# Altium schematic symbol library PTUMotorDriver.SchLib: 64 symbols
Pins are listed as number, name and electrical type; pins without a type are passive.

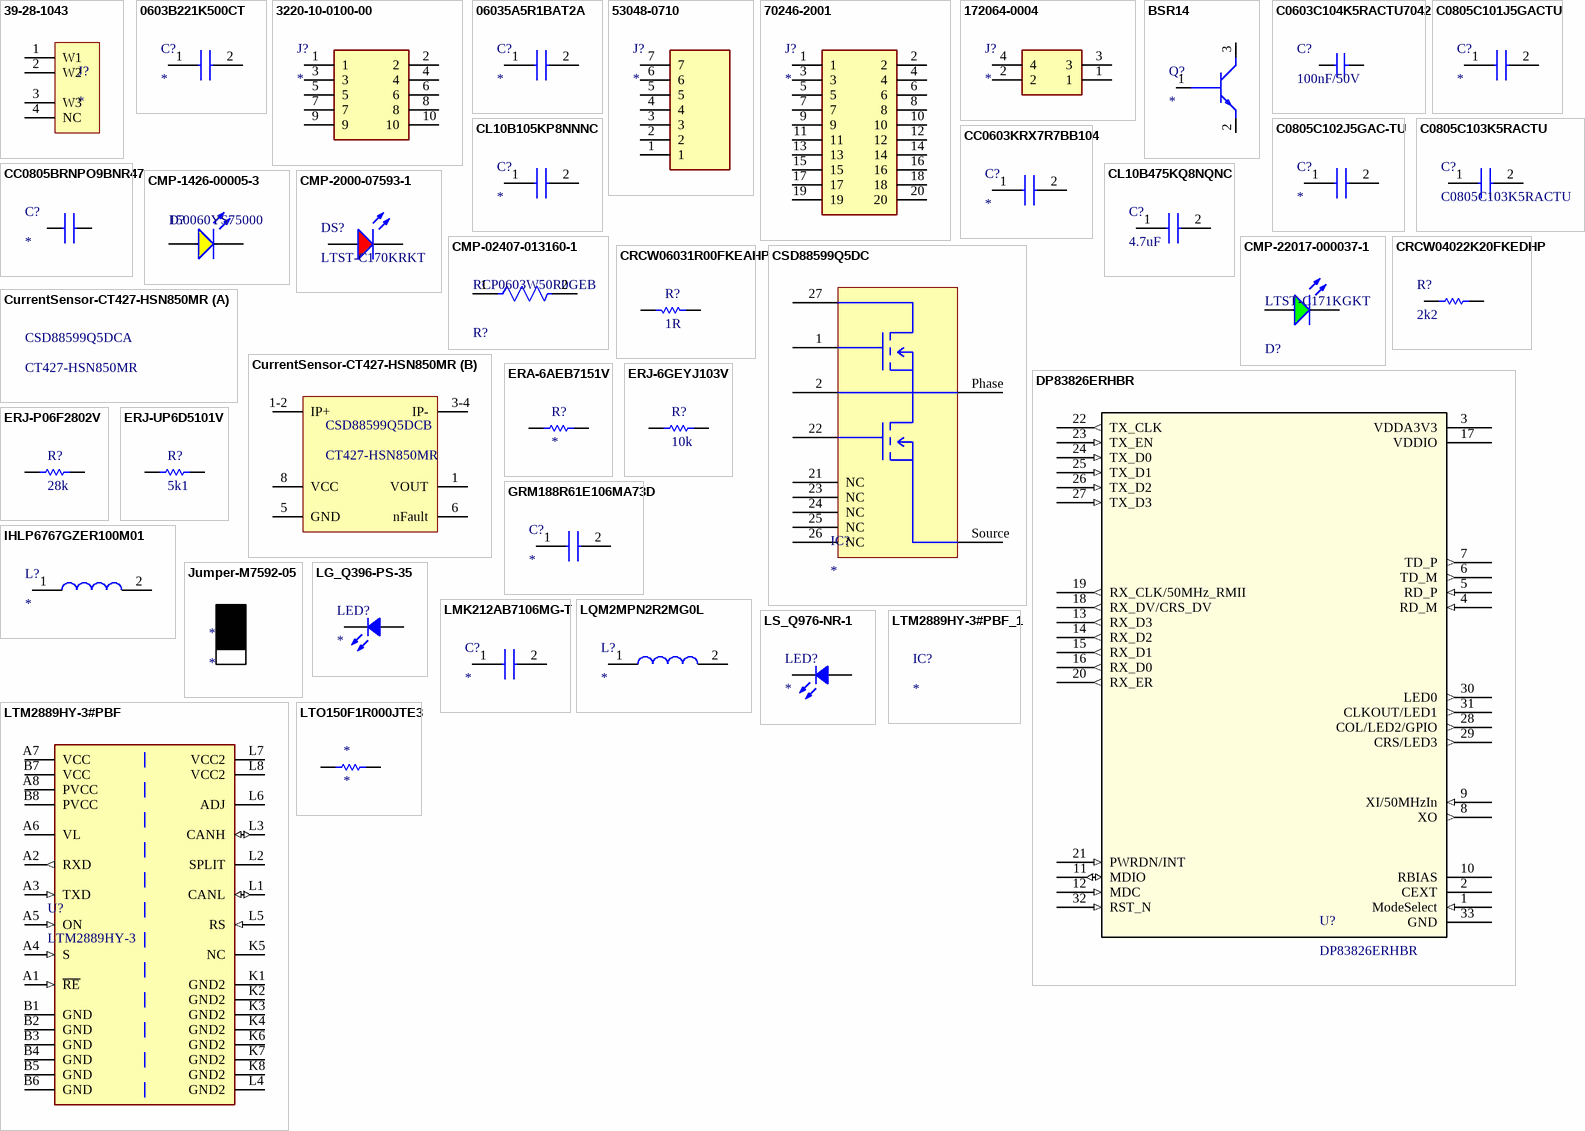
[diagram p0: symbols 39-28-1043 to LTO150F1R000JTE3]

## 39-28-1043
designator J?
Connector; Manufacturer_Name: Molex; Datasheet Link: https://www.molex.com/pdm_docs/sd/039281023_sd.pdf; Height: 12.8mm; Manufacturer_Part_Number: 39-28-1043; Mouser Part Number: 538-39-28-1043; Mouser Price/Stock: https://www.mouser.co.uk/ProductDetail/Molex/39-28-1043?qs=LQQHZ4xw2XCMHoV0KRLGhg%3D%3D; Arrow Part Number: 39-28-1043; Arrow Price/Stock: https://www.arrow.com/en/products/39-28-1043/molex?region=nac; Supplier 1: Mouser; Supplier Part Number 1: 538-39-28-1043; Supplier 2: Digikey; Supplier Part Number 2: WM3801-ND
footprint 39-28-1043
pins: 1 W1, 2 W2, 3 W3, 4 NC

## 0603B221K500CT
designator C?
Capacitor; Manufacturer_Name: Walsin Technology Corporation; Manufacturer_Part_Number: 0603B221K500CT; Datasheet Link: http://www.passivecomponent.com/wp-content/uploads/datasheet/WTC_MLCC_General_Purpose.pdf; Height: 0.87mm; Supplier 1: Digikey; Supplier Part Number 1: 1292-1407-1-ND; Supplier 2: Digikey; Supplier Part Number 2: 1292-1407-6-ND
footprint CAPC1608X87N
pins: 1, 2

## 3220-10-0100-00
designator J?
Connector; Manufacturer_Name: CNC Tech; Manufacturer_Part_Number: 3220-10-0100-00; Datasheet Link: https://datasheet.datasheetarchive.com/originals/dk/DKDS-7/133059.pdf; Height: 5.6mm; Arrow Part Number: 3220-10-0100-00; Arrow Price/Stock: https://www.arrow.com/en/products/3220-10-0100-00/cnc-tech-llc?utm_currency=USD&region=nac
footprint 322010010000
pins: 1, 2, 3, 4, 5, 6, 7, 8, 9, 10

## 06035A5R1BAT2A
designator C?
Capacitor; Manufacturer_Name: Kyocera AVX; Manufacturer_Part_Number: 06035A5R1BAT2A; Datasheet Link: https://componentsearchengine.com/Datasheets/1/06031A100FAT2A.pdf; Height: 0.9mm; Mouser Part Number: 581-06035A5R1BAT2A; Mouser Price/Stock: https://www.mouser.com/Search/Refine.aspx?Keyword=581-06035A5R1BAT2A; Supplier 1: Digikey; Supplier Part Number 1: 478-12709-1-ND; Supplier 2: Digikey; Supplier Part Number 2: 478-12709-6-ND
footprint CAPC1608X90N
pins: 1, 2

## 53048-0710
designator J?
Connector; Manufacturer_Name: Molex; Manufacturer_Part_Number: 53048-0710; Description: Headers & Wire Housings RIGHT ANGLE HDR 7P; Datasheet Link: https://www.molex.com/pdm_docs/sd/530480710_sd.pdf; Height: 3.7mm; Mouser Part Number: 538-53048-0710; Mouser Price/Stock: https://www.mouser.co.uk/ProductDetail/Molex/53048-0710?qs=W6FIH8d5%2F%2F31dqvNeYcvcQ%3D%3D
footprint 530480710
pins: 1, 2, 3, 4, 5, 6, 7

## 70246-2001
designator J?
Connector; Manufacturer_Name: Molex; Manufacturer_Part_Number: 70246-2001; Datasheet Link: https://componentsearchengine.com/Datasheets/2/70246-2001.pdf; Height: 9.47mm; Mouser Part Number: 538-70246-2001; Mouser Price/Stock: https://www.mouser.co.uk/ProductDetail/Molex/70246-2001?qs=L7RdmAxh%252BcMgmUPcB5dMoQ%3D%3D
footprint SHDR20W99P254_2X10_3302X889X947P
pins: 1, 2, 3, 4, 5, 6, 7, 8, 9, 10, 11, 12, 13, 14, 15, 16, 17, 18, 19, 20

## 172064-0004
designator J?
Connector; Manufacturer_Name: Molex; Manufacturer_Part_Number: 172064-0004; Datasheet Link: http://www.molex.com/webdocs/datasheets/pdf/en-us//1720640004_PCB_HEADERS.pdf; Height: 14.83mm; Mouser Part Number: 538-172064-0004; Mouser Price/Stock: https://www.mouser.co.uk/ProductDetail/Molex/172064-0004?qs=MxnWX8BLHKcFAHN7UoxOCg%3D%3D; Arrow Part Number: 172064-0004; Arrow Price/Stock: https://www.arrow.com/en/products/1720640004/molex?region=nac
footprint 1720640004
pins: 1, 2, 3, 4

## BSR14
designator Q?
Transistor BJT NPN; Manufacturer_Name: Nexperia; Manufacturer_Part_Number: BSR14; Datasheet Link: https://datasheet.datasheetarchive.com/originals/distributors/Datasheets-20/DSA-383686.pdf; Height: 1.1mm; Mouser Part Number: N/A; Mouser Price/Stock: https://www.mouser.com/Search/Refine.aspx?Keyword=N%2FA; Supplier 1: Digikey; Supplier Part Number 1: 1727-4933-1-ND
footprint TL431CDBZR215
pins: 1 B, 2 E, 3 C

## C0603C104K5RACTU7042
designator C?, comment 100nF/50V
Capacitor 100nF 50V 0603; Manufacturer_Name: KEMET; Manufacturer_Part_Number: C0603C104K5RACTU7042; Datasheet Link: https://www.arrow.com/en/products/c0603c104k5ractu7042/kemet-corporation; Height: 0.95mm; Arrow Part Number: C0603C104K5RACTU7042; Arrow Price/Stock: https://www.arrow.com/en/products/c0603c104k5ractu7042/kemet-corporation
footprint CAPC1608X95N
pins: 1, 2

## C0805C101J5GACTU
designator C?
Capacitor; Manufacturer_Name: KEMET; Manufacturer_Part_Number: C0805C101J5GACTU; Datasheet Link: https://content.kemet.com/datasheets/KEM_C1003_C0G_SMD.pdf; Height: 1.1mm; Mouser Part Number: 80-C0805C101J5G; Mouser Price/Stock: https://www.mouser.co.uk/ProductDetail/KEMET/C0805C101J5GACTU?qs=6pfgPk%252B7Yz7wCPQSSQ%2FBjg%3D%3D; Arrow Part Number: C0805C101J5GACTU; Arrow Price/Stock: https://www.arrow.com/en/products/c0805c101j5gactu/kemet-corporation; Supplier 1: Mouser; Supplier Part Number 1: 80-C0805C101J5G
footprint C0805
pins: 1, 2

## C0805C102J5GAC-TU
designator C?
Capacitor; Manufacturer_Name: KEMET; Manufacturer_Part_Number: C0805C102J5GAC-TU; Datasheet Link: https://www.kemet.com/specsheet/C0805C102J5GACTU; Height: 0.88mm; Arrow Part Number: C0805C102J5GAC-TU; Arrow Price/Stock: https://www.arrow.com/en/products/c0805c102j5gactu/kemet-corporation; Supplier 1: Mouser; Supplier Part Number 1: 80-C0805C102J5G
footprint CAPC2012X88N
pins: 1, 2

## C0805C103K5RACTU
designator C?
Capacitor; Manufacturer_Name: KEMET; Datasheet Link: https://content.kemet.com/datasheets/KEM_C1002_X7R_SMD.pdf; Height: 1.1mm; Manufacturer_Part_Number: C0805C103K5RACTU; Mouser Part Number: 80-C0805C103K5R; Mouser Price/Stock: https://www.mouser.co.uk/ProductDetail/KEMET/C0805C103K5RACTU?qs=cw4evkOYbeJ17Si5k%2FymvA%3D%3D; Arrow Part Number: C0805C103K5RACTU; Arrow Price/Stock: https://www.arrow.com/en/products/c0805c103k5ractu/kemet-corporation?region=nac; Supplier 1: Mouser; Supplier Part Number 1: 80-C0805C103K5R
footprint C0805
pins: 1, 2

## CC0603KRX7R7BB104
designator C?
Capacitor; Manufacturer_Name: YAGEO; Manufacturer_Part_Number: CC0603KRX7R7BB104; Datasheet Link: https://www.yageo.com/en/Chart/Download/pdf/CC0603KRX7R7BB104; Height: 0.9mm; Mouser Part Number: 603-CC603KRX7R7BB104; Mouser Price/Stock: https://www.mouser.co.uk/ProductDetail/YAGEO/CC0603KRX7R7BB104?qs=AgBp2OyFlx8KPmNTlFoWXA%3D%3D; Arrow Part Number: CC0603KRX7R7BB104; Arrow Price/Stock: https://www.arrow.com/en/products/cc0603krx7r7bb104/yageo?utm_currency=USD&region=europe; Supplier 1: Digikey; Supplier Part Number 1: 311-1088-6-ND
footprint CAPC1608X90N
pins: 1, 2

## CC0805BRNPO9BNR47
designator C?
Capacitor; Manufacturer_Name: YAGEO; Manufacturer_Part_Number: CC0805BRNPO9BNR47; Datasheet Link: https://www.mouser.in/ProductDetail/YAGEO/CC0805BRNPO9BNR47?qs=7s%252B3O6pAiyAZbPSWuoMBdQ%3D%3D; Height: 0.7mm; Mouser Part Number: 603-CC805BRNPO9BNR47; Mouser Price/Stock: https://www.mouser.co.uk/ProductDetail/YAGEO/CC0805BRNPO9BNR47?qs=7s%252B3O6pAiyAZbPSWuoMBdQ%3D%3D; Supplier 1: Digikey; Supplier Part Number 1: 13-CC0805BRNPO9BNR47DKR-ND
footprint CAPC2012X70N
pins: 1, 2

## CL10B105KP8NNNC
designator C?
Capacitor; Manufacturer_Name: SAMSUNG; Manufacturer_Part_Number: CL10B105KP8NNNC; Datasheet Link: https://media.digikey.com/pdf/Data%20Sheets/Samsung%20PDFs/CL_Series_MLCC_ds.pdf; Height: 0.9mm; Mouser Part Number: 187-CL10B105KP8NNNC; Mouser Price/Stock: https://www.mouser.co.uk/ProductDetail/Samsung-Electro-Mechanics/CL10B105KP8NNNC?qs=X6jEic%2FHinD9krOsbkFZow%3D%3D; Arrow Part Number: CL10B105KP8NNNC; Arrow Price/Stock: https://www.arrow.com/en/products/cl10b105kp8nnnc/samsung-electro-mechanics?region=europe; Supplier 1: Digikey; Supplier Part Number 1: 1276-1946-1-ND
footprint CAPC1608X90N
pins: 1, 2

## CL10B475KQ8NQNC
designator C?, comment 4.7uF
Capacitor; Manufacturer_Name: SAMSUNG; Manufacturer_Part_Number: CL10B475KQ8NQNC; Datasheet Link: https://datasheet.datasheetarchive.com/originals/distributors/Datasheets-DGA10/2410603.pdf; Height: 0.95mm; Mouser Part Number: 187-CL10B475KQ8NQNC; Mouser Price/Stock: https://www.mouser.co.uk/ProductDetail/Samsung-Electro-Mechanics/CL10B475KQ8NQNC?qs=6tbHoouHnQxd6rcaSwpT7Q%3D%3D; Arrow Part Number: CL10B475KQ8NQNC; Arrow Price/Stock: https://www.arrow.com/en/products/cl10b475kq8nqnc/samsung-electro-mechanics; Supplier 1: Digikey; Supplier Part Number 1: 1276-2087-1-ND; Supplier 2: Mouser; Supplier Part Number 2: 187-CL10B475KQ8NQNC
footprint CAPC1608X95N
pins: 1, 2

## CMP-1426-00005-3
designator D?, comment 150060YS75000
WL-SMCW SMT Mono-Color Chip LED Waterclear; Power Dissipation: 72mW; Reverse Voltage: 5V; Forward Voltage: 2V; Test Current: 20mA; Luminous Intensity: 120mcd; Max Junction Temperature (Tj): 95°C; Wavelength: 590nm; Color: Yellow; Forward Current: 100mA; Lens Style: Clear, Rectangular; Viewing Angle: 140°; Peak Wavelength: 595nm; Case Code (Metric): 1608; Length: 1.6mm; Max Reverse Voltage (DC): 5V; Case Code (Imperial): 0603; Dominant Wavelength: 590nm; Mount: Surface Mount; Max Operating Temperature: 85°C; Min Operating Temperature: -40°C; Packaging: Tape and Reel; REACH SVHC: Unknown; Width: 800µm; Case/Package: 0603; Height: 700µm; RoHS: Compliant; Supplier 1: Mouser; Supplier Part Number 1: 710-150060YS75000
footprint WL-SMCW_0603_150060xx75000 (SMD Mono-color Chip LED, body 1.60 x 0.80 mm)
pins: 1 K, 2 A

## CMP-2000-07593-1
designator DS?, comment LTST-C170KRKT
LED Red, 75 mW, 54 mcd, -55 to 85 degC, 2-Pin SMD, RoHS, Tape and Reel; Manufacturer: Lite-On; Lens Transparency: Clear; Number of Elements: 1; Power Rating: 75mW; Luminous Intensity: 54mcd; Viewing Angle: 130degrees; Forward Current: 30mA; Wavelength: 639nm; Lens Style: Rectangular; Case\/Package: 0805; Test Current: 20mA; Dominant Wavelength: 631nm; Forward Voltage: 2V; Lens Colour: Colorless; Min Operating Temperature: -55degC; RoHSCompliant: True; Length: 3.2mm; Width: 1.25mm; Mount: SurfaceMount; Packaging: TapeandReel; Number of LEDs: 1; Radiation Hardening: No; Datasheet URL: http://optoelectronics.liteon.com/upload/download/DS-22-99-0150/LTST-C170KRKT.pdf; Datasheet Version: Rev. D, 11/2014; Case Code (Metric): 2012; Height: 1.1mm; Number of Pins: 2; Package Description: 2-Pin Surface Mount Device, Body 2 x 1.25 mm; Manufacturer URL: http://www.us.liteon.com/; Lead Free: LeadFree; Illumination Colour: Red; Colour: Red; Case Code (Imperial): 0805; Max Operating Temperature: 85degC; Power Dissipation: 75mW; Mounting Technology: SurfaceMount; Package Reference: C170KRKT; Package Quantity: 1; Depth: 1.6mm; Supplier 1: Mouser; Supplier Part Number 1: 859-LTST-C170KRKT
footprint LTST-C170KRKT_V (SMD, 2-Leads, Body 2x1.25mm)
pins: 1 K, 2 A

## CMP-02407-013160-1
designator R?, comment RCP0603W50R0GEB
RES SMD 50 OHM 2% 1.5W 0603; Max Power Dissipation: 3.9W; Resistance: 50R; Temperature Coefficient: 150ppm/°C; Resistor Type: Thick Film; Case Code (Imperial): 0603; Technology: THICK FILM; Termination: Solder; Width: 0.032inch; Number of Terminations: 2; Mount: Surface Mount; Features: Moisture Resistant; Series: RCP; Depth: 0.81mm; Case/Package: 0603; Max Operating Temperature: 155°C; Power Rating: 3.9W; Min Operating Temperature: -55°C; Case Code (Metric): 1608; Height: 0.023inch; Length: 0.063inch; Tolerance: 2%; Packaging: Cut Tape
footprint FP-RCP0603W-MFG
footprint FP-RCP0603W-IPC_B
footprint FP-RCP0603W-IPC_A
footprint FP-RCP0603W-IPC_C
pins: 1, 2

## CMP-22017-000037-1
designator D?, comment LTST-C171KGKT
LED GREEN CLEAR SMD; Number of LEDs: 1; Viewing Angle: 130°; Lens Style: Rectangular; Dominant Wavelength: 571nm; Test Current: 20mA; Luminous Intensity: 35mcd; Power Rating: 75mW; Forward Voltage: 2.4V; Forward Current: 30mA; Reverse Voltage: 5V; Lens Color: Colorless; Wavelength: 574nm; Height: 0.8mm; Illumination Color: Green; Length: 2mm; Case/Package: 0805; Number of Pins: 2; Number of Elements: 1; Package Quantity: 1; Depth: 1.25mm; Lens Transparency: Clear; Width: 1.25mm; Color: Green; Radiation Hardening: No; Mount: Surface Mount; Packaging: Tape and Reel; Case Code (Metric): 2012; Lead Free: Lead Free; Max Operating Temperature: 85°C; Min Operating Temperature: -55°C; Case Code (Imperial): 0805; Power Dissipation: 75mW; Supplier 1: Mouser; Supplier Part Number 1: 859-LTST-C171KGKT
footprint FP-LTST-C171KGKT-MFG
pins: 1 K, 2 A

## CRCW04022K20FKEDHP
designator R?, comment 2k2
Resistor; Manufacturer_Name: Vishay; Manufacturer_Part_Number: CRCW04022K20FKEDHP; Datasheet Link: http://www.vishay.com/docs/20035/dcrcwe3.pdf; Height: 0.4mm; Mouser Part Number: 71-CRCW04022K20FKEDH; Mouser Price/Stock: https://www.mouser.co.uk/ProductDetail/Vishay-Dale/CRCW04022K20FKEDHP?qs=VtqDKwJMr4Eb5xHPdQK8cw%3D%3D; Arrow Part Number: CRCW04022K20FKEDHP; Arrow Price/Stock: https://www.arrow.com/en/products/crcw04022k20fkedhp/vishay?region=europe; Supplier 1: Mouser; Supplier Part Number 1: 71-CRCW04022K20FKEDH; Supplier 2: Digikey; Supplier Part Number 2: 541-2.20KYCT-ND
footprint RESC1005X40N
pins: 1, 2

## CRCW06031R00FKEAHP
designator R?, comment 1R
Fixed Resistor, Metal Glaze/thick Film, 0.33W, 1ohm, 75V, 1% +/-Tol, 100ppm/Cel, Surface Mount, 0603; Manufacturer: Vishay Dale; Manufacturer Part Number: CRCW06031R00FKEAHP; Power: 250mW; Rated Temperature: 70°C; Temperature Coefficient (ppm/Cel): 100; Package Height: 0.45mm; Package Length: 1.6mm; Package Width: 0.85mm; Reference Standard: AEC-Q200; Supplier: Digikey; Supplier Part Number: 541-1.00SCT-ND; RoHS: Yes; Category: Chip SMD Resistors; Stock: 133382; Pricing: 1=0.2, 10=0.102, 100=0.0596, 1000=0.0402, 2500=0.03708 (USD); Mounting Technology: Surface Mount; Pins: 2; Package Shape: Rectangular; Case/Package: 0603; Terminal Finish: Nickel; Min Operating Temperature: -55°C; Max Operating Temperature: 155°C; Tolerance: 1%; JESD-609 Code: e3; Resistor Type: FIXED RESISTOR; Construction: Chip; Packaging: Tape and Reel; Value: 1R; Technology: METAL GLAZE/THICK FILM; Termination: Wraparound; Working Voltage: 75V; Reach SVHC Compliant: Yes; RoHS Compliant: Yes; ComponentLink1URL: https://datasheet.ciiva.com:443/pdfs/VipMasterIC/IC/VISH/VISH-S-A0009391795/VISH-S-A0009391795-1.pdf?src-supplier=IHS+Markit; ComponentLink1Description: https://datasheet.ciiva.com:443/pdfs/VipMasterIC/IC/VISH/VISH-S-A0009391795/VISH-S-A0009391795-1.pdf?src-supplier=IHS+Markit; ComponentLink2URL: https://datasheet.ciiva.com/2474/crcwhpe3-2474518.pdf?src-supplier=Digikey; ComponentLink2Description: https://datasheet.ciiva.com/2474/crcwhpe3-2474518.pdf?src-supplier=Digikey; ComponentLink3URL: https://datasheet.ciiva.com/2474/crcwhpe3-2474519.pdf?src-supplier=Digikey; ComponentLink3Description: https://datasheet.ciiva.com/2474/crcwhpe3-2474519.pdf?src-supplier=Digikey; ComponentLink4URL: https://datasheet.ciiva.com/2474/crcwhpe3-2474520.pdf?src-supplier=Digikey; ComponentLink4Description: https://datasheet.ciiva.com/2474/crcwhpe3-2474520.pdf?src-supplier=Digikey; Supplier 1: Mouser; Supplier Part Number 1: 71-CRCW06031R00FKEAH; Supplier 2: Digikey; Supplier Part Number 2: 541-1.00SCT-ND
footprint FP-CRCW0603-HPe3-IPC_C
pins: 1, 2

## CSD88599Q5DC
designator IC?
Integrated Circuit; Manufacturer_Name: Texas Instruments; Manufacturer_Part_Number: CSD88599Q5DC; Datasheet Link: http://www.ti.com/lit/ds/symlink/csd88599q5dc.pdf; Height: 1.05mm; Mouser Part Number: 595-CSD88599Q5DC; Mouser Price/Stock: https://www.mouser.co.uk/ProductDetail/Texas-Instruments/CSD88599Q5DC?qs=5aG0NVq1C4z5gVbcQ76feA%3D%3D; Arrow Part Number: CSD88599Q5DC; Arrow Price/Stock: null?region=nac
footprint CSD88599Q5DC
pins: 1, 2, 21 NC, 22, 23 NC, 24 NC, 25 NC, 26 NC, 27, Phase, Source

## CurrentSensor-CT427-HSN850MR
designator CSD88599Q5DC, comment CT427-HSN850MR
Supplier 1: Mouser; Supplier Part Number 1: 462-CT427-HSN850MR
footprint SOIC8-CT427
part B pins: 1 VOUT, 1-2 IP+, 3-4 IP-, 5 GND, 6 nFault, 8 VCC

## DP83826ERHBR
designator U?
Ethernet Transceiver, 1-Trnsvr, PQCC32; Manufacturer: Texas Instruments; Supplier: Digikey; Supplier Part Number: 296-DP83826ERHBRCT-ND; Manufacturer Part Number: DP83826ERHBR; RoHS: Yes; Category: Ethernet Interface ICs; Stock: 2127; Pricing: 1=3.1, 10=2.321, 25=2.1264, 100=1.9128, 250=1.81096, 500=1.74958, 1000=1.69905 (USD); ComponentLink1URL: https://www.ti.com:443/lit/ds/symlink/dp83826e.pdf?src-supplier=IHS+Markit; ComponentLink1Description: https://www.ti.com:443/lit/ds/symlink/dp83826e.pdf?src-supplier=IHS+Markit; ComponentLink2URL: http://www.ti.com/general/docs/suppproductinfo.tsp?distId=10&amp;gotoUrl=http%3A%2F%2Fwww.ti.com%2Flit%2Fgpn%2Fdp83826e&src-supplier=Digikey; ComponentLink2Description: http://www.ti.com/general/docs/suppproductinfo.tsp?distId=10&amp;gotoUrl=http%3A%2F%2Fwww.ti.com%2Flit%2Fgpn%2Fdp83826e&src-supplier=Digikey; Supplier 1: Mouser; Supplier Part Number 1: 595-DP83826ERHBR; Supplier 2: Digikey; Supplier Part Number 2: 296-DP83826ERHBRCT-ND
footprint QFN_ERHBR_TEX
pins: 1 ModeSelect (in), 2 CEXT, 3 VDDA3V3 (power), 4 RD_M (in), 5 RD_P (in), 6 TD_M (out), 7 TD_P (out), 8 XO (out), 9 XI/50MHzIn (in), 10 RBIAS, 11 MDIO (io), 12 MDC (in), 13 RX_D3 (out), 14 RX_D2 (out), 15 RX_D1 (out), 16 RX_D0 (out), 17 VDDIO (power), 18 RX_DV/CRS_DV (out), 19 RX_CLK/50MHz_RMII (out), 20 RX_ER (out), 21 PWRDN/INT (in), 22 TX_CLK (out), 23 TX_EN (in), 24 TX_D0 (in), 25 TX_D1 (in), 26 TX_D2 (in), 27 TX_D3 (in), 28 COL/LED2/GPIO (out), 29 CRS/LED3 (out), 30 LED0 (out), 31 CLKOUT/LED1 (out), 32 RST_N (in), 33 GND (power)

## ERA-6AEB7151V
designator R?
Resistor; Manufacturer_Name: Panasonic; Manufacturer_Part_Number: ERA-6AEB7151V; Datasheet Link: https://industrial.panasonic.com/cdbs/www-data/pdf/RDM0000/AOA0000C307.pdf; Height: 0.6mm; Mouser Part Number: 667-ERA-6AEB7151V; Mouser Price/Stock: https://www.mouser.com/Search/Refine.aspx?Keyword=667-ERA-6AEB7151V; Supplier 1: Mouser; Supplier Part Number 1: 667-ERA-6AEB7151V; Supplier 2: Digikey; Supplier Part Number 2: P7.15KDACT-ND
footprint ERA6AEB101V
pins: 1, 2

## ERJ-6GEYJ103V
designator R?, comment 10k
10k Resistor; Manufacturer_Name: Panasonic; Manufacturer_Part_Number: ERJ-6GEYJ103V; Datasheet Link: https://datasheet.datasheetarchive.com/originals/distributors/DKDS40/DSANUWW0010911.pdf; Height: 0.7mm; Mouser Part Number: 667-ERJ-6GEYJ103V; Mouser Price/Stock: https://www.mouser.co.uk/ProductDetail/Panasonic/ERJ-6GEYJ103V?qs=tQNqqtTOejK5rw%252BRxJVxUA%3D%3D; Arrow Part Number: ERJ-6GEYJ103V; Arrow Price/Stock: https://www.arrow.com/en/products/erj6geyj103v/panasonic?region=nac; Supplier 1: Mouser; Supplier Part Number 1: 71-CRCW0603-10K-E3; Supplier 2: Digikey; Supplier Part Number 2: 541-10.0KHCT-ND
footprint RESC2012X70N
pins: 1, 2

## ERJ-P06F2802V
designator R?, comment 28k
Resistor; Manufacturer_Name: Panasonic; Manufacturer_Part_Number: ERJ-P06F2802V; Description: Anti-Surge Thick Film Chip Resistor; Datasheet Link: http://industrial.panasonic.com/cdbs/www-data/pdf/RDA0000/AOA0000C102.pdf; Height: 0.7mm; Supplier 1: Farnell; Supplier Part Number 1: 2312214RL
footprint ERJP06D1000V
pins: 1, 2

## ERJ-UP6D5101V
designator R?, comment 5k1
Resistor; Manufacturer_Name: Panasonic; Manufacturer_Part_Number: ERJ-UP6D5101V; Description: Anti-Sulfurated Thick Film Chip Resistors/ Anti-Surge Type; Datasheet Link: https://industrial.panasonic.com/cdbs/www-data/pdf/RDP0000/AOA0000C337.pdf; Height: 0.7mm; Mouser Part Number: 667-ERJ-UP6D5101V; Mouser Price/Stock: https://www.mouser.co.uk/ProductDetail/Panasonic/ERJ-UP6D5101V?qs=ZcfC38r4Pouz7%2FLHthUDHQ%3D%3D; Arrow Part Number: ERJ-UP6D5101V; Arrow Price/Stock: https://www.arrow.com/en/products/erj-up6d5101v/panasonic?utm_currency=USD&region=nac; Supplier 1: Mouser; Supplier Part Number 1: 667-ERJ-UP6D5101V
footprint ERJUP6
pins: 1, 2

## GRM188R61E106MA73D
designator C?
Capacitor; Manufacturer_Name: Murata Electronics; Manufacturer_Part_Number: GRM188R61E106MA73D; Datasheet Link: https://search.murata.co.jp/Ceramy/image/img/A01X/G101/ENG/GRM188R61E106MA73-01A.pdf; Height: 0.9mm; Mouser Part Number: 81-GRM188R61E106MA3D; Mouser Price/Stock: https://www.mouser.co.uk/ProductDetail/Murata-Electronics/GRM188R61E106MA73D?qs=PoXZt%252B2CjACpktoD15Kv0Q%3D%3D; Arrow Part Number: GRM188R61E106MA73D; Arrow Price/Stock: https://www.arrow.com/en/products/grm188r61e106ma73d/murata-manufacturing?utm_currency=USD&region=nac
footprint CAPC1608X90N
pins: 1, 2

## IHLP6767GZER100M01
designator L?
Inductor; Manufacturer_Name: Vishay; Manufacturer_Part_Number: IHLP6767GZER100M01; Datasheet Link: https://componentsearchengine.com/Datasheets/1/IHLP6767GZER100M01.pdf; Height: 7mm; Mouser Part Number: 70-IHLP6767GZER100M0; Mouser Price/Stock: https://www.mouser.co.uk/ProductDetail/Vishay-Dale/IHLP6767GZER100M01?qs=6luCnr706CwMWNZNz3yZsQ%3D%3D; Arrow Part Number: IHLP6767GZER100M01; Arrow Price/Stock: https://www.arrow.com/en/products/ihlp6767gzer100m01/vishay?utm_currency=USD&region=nac
footprint INDPM172172X700N
pins: 1, 2

## Jumper-M7592-05
designator *

## LG_Q396-PS-35
designator LED?
Green LED; Manufacturer_Name: ams OSRAM; Manufacturer_Part_Number: LG Q396-PS-35; Datasheet Link: https://mouser.componentsearchengine.com/Datasheets/2/LG%20Q396-PS-35.pdf; Height: 0.4mm; Mouser Part Number: 720-LGQ396A3964; Mouser Price/Stock: https://www.mouser.co.uk/ProductDetail/ams-OSRAM/LG-Q396-PS-35?qs=xC%252BE9h5iuX5%252BCocujXxOpw%3D%3D; Arrow Part Number: LG Q396-PS-35; Arrow Price/Stock: https://www.arrow.com/en/products/lgq396-ps-35/osram-opto-semiconductors?region=nac; Supplier 1: Mouser; Supplier Part Number 1: 720-LGQ396A3964
footprint LGQ396PS35
pins: 1, 2

## LMK212AB7106MG-T
designator C?
Capacitor; Manufacturer_Name: TAIYO YUDEN; Manufacturer_Part_Number: LMK212AB7106MG-T; Datasheet Link: https://datasheet.datasheetarchive.com/originals/distributors/Datasheets-DGA20/25674.pdf; Height: 1.4mm; Mouser Part Number: 963-LMK212AB7106MG-T; Mouser Price/Stock: https://www.mouser.co.uk/ProductDetail/Taiyo-Yuden/LMK212AB7106MG-T?qs=CNQs48zzdnrud19jlu61Cg%3D%3D; Supplier 1: Digikey; Supplier Part Number 1: 587-3417-1-ND
footprint CAPC2013X140N
pins: 1, 2

## LQM2MPN2R2MG0L
designator L?
Inductor; Manufacturer_Name: Murata Electronics; Manufacturer_Part_Number: LQM2MPN2R2MG0L; Datasheet Link: https://search.murata.co.jp/Ceramy/image/img/P02/JELF243B-0022.pdf; Height: 1mm; Mouser Part Number: 81-LQM2MPN2R2MG0L; Mouser Price/Stock: https://www.mouser.co.uk/ProductDetail/Murata-Electronics/LQM2MPN2R2MG0L?qs=YinlzBdtFMj9%2Fj5t8GanUg%3D%3D; Arrow Part Number: LQM2MPN2R2MG0L; Arrow Price/Stock: https://www.arrow.com/en/products/lqm2mpn2r2mg0l/murata-manufacturing?utm_currency=USD&region=nac; Supplier 1: Mouser; Supplier Part Number 1: 81-LQM2MPN2R2MG0L
footprint LQM2MPN1R0NG0L (Footprint not found)
pins: 1, 2

## LS_Q976-NR-1
designator LED?
Red LED; Manufacturer_Name: ams OSRAM; Manufacturer_Part_Number: LS Q976-NR-1; Datasheet Link: https://datasheet.datasheetarchive.com/originals/distributors/DKDS41/DSANUWW0036602.pdf; Height: 0.8mm; Mouser Part Number: 720-LSQ976-NR-1; Mouser Price/Stock: https://www.mouser.co.uk/ProductDetail/ams-OSRAM/LS-Q976-NR-1?qs=K5ta8V%252BWhtbwdFgXKu1Oiw%3D%3D; Arrow Part Number: LS Q976-NR-1; Arrow Price/Stock: https://www.arrow.com/en/products/ls-q976-nr-1/ams-osram?region=europe
footprint LEDC1608X80N
pins: 1, 2

## LTM2889HY-3#PBF
designator U?, comment LTM2889HY-3
footprint FP-BGA-32-05-08-1851-IPC_B
pins: A1 ~{RE} (in), A2 RXD (out), A3 TXD (in), A4 S (in), A5 ON (in), A6 VL (power), A7 VCC (power), A8 PVCC (power), B1 GND (power), B2 GND (power), B3 GND (power), B4 GND (power), B5 GND (power), B6 GND (power), B7 VCC (power), B8 PVCC (power), K1 GND2 (power), K2 GND2 (power), K3 GND2 (power), K4 GND2 (power), K5 NC, K6 GND2 (power), K7 GND2 (power), K8 GND2 (power), L1 CANL (io), L2 SPLIT, L3 CANH (io), L4 GND2 (power), L5 RS (in), L6 ADJ, L7 VCC2 (power), L8 VCC2 (power)

## LTM2889HY-3#PBF_1
designator IC?
Integrated Circuit; Manufacturer_Name: Analog Devices; Manufacturer_Part_Number: LTM2889HY-3#PBF; Datasheet Link: https://www.analog.com/media/en/technical-documentation/data-sheets/2889fa.pdf; Height: 3.62mm; Mouser Part Number: 584-LTM2889HY-3#PBF; Mouser Price/Stock: https://www.mouser.co.uk/ProductDetail/Analog-Devices/LTM2889HY-3PBF?qs=oahfZPh6IAJ1CTu6iUCsCA%3D%3D; Arrow Part Number: LTM2889HY-3#PBF; Arrow Price/Stock: https://www.arrow.com/en/products/ltm2889hy-3pbf/analog-devices?region=europe
footprint BGA32C127P8X11_1125X1500X362

## LTO150F1R000JTE3
designator *
Fixed Resistor, Thick Film, 150W, 1ohm, 500V, 5% +/-Tol, 350ppm/Cel, Through Hole Mount; Manufacturer: Vishay Sfernice; Manufacturer Part Number: LTO150F1R000JTE3; Supplier: Mouser; Supplier Part Number: 72-LTO150F1R000JTE3; RoHS: Yes; Category: Through-Hole Resistors; Stock: 67; Pricing: 1=9.98, 10=8.93, 50=7.51, 100=7.34, 1000=5.69, 10000=5.38 (USD); RoHS Compliant: Yes; ComponentLink1URL: https://datasheet.ciiva.com:443/pdfs/VipMasterIC/IC/VISH/VISH-S-A0005308492/VISH-S-A0005308492-1.pdf?src-supplier=IHS+Markit; ComponentLink1Description: https://datasheet.ciiva.com:443/pdfs/VipMasterIC/IC/VISH/VISH-S-A0005308492/VISH-S-A0005308492-1.pdf?src-supplier=IHS+Markit; ComponentLink2URL: https://media.digikey.com/pdf/Data%20Sheets/Vishay%20Sfernice%20PDFs/LTO_150_Series.pdf?src-supplier=Digikey; ComponentLink2Description: https://media.digikey.com/pdf/Data%20Sheets/Vishay%20Sfernice%20PDFs/LTO_150_Series.pdf?src-supplier=Digikey; Supplier 1: Mouser; Supplier Part Number 1: 72-LTO150F1R000JTE3; Supplier 2: Digikey; Supplier Part Number 2: 716-1205-ND
footprint FP-LTO150-MFG
pins: 1, 2

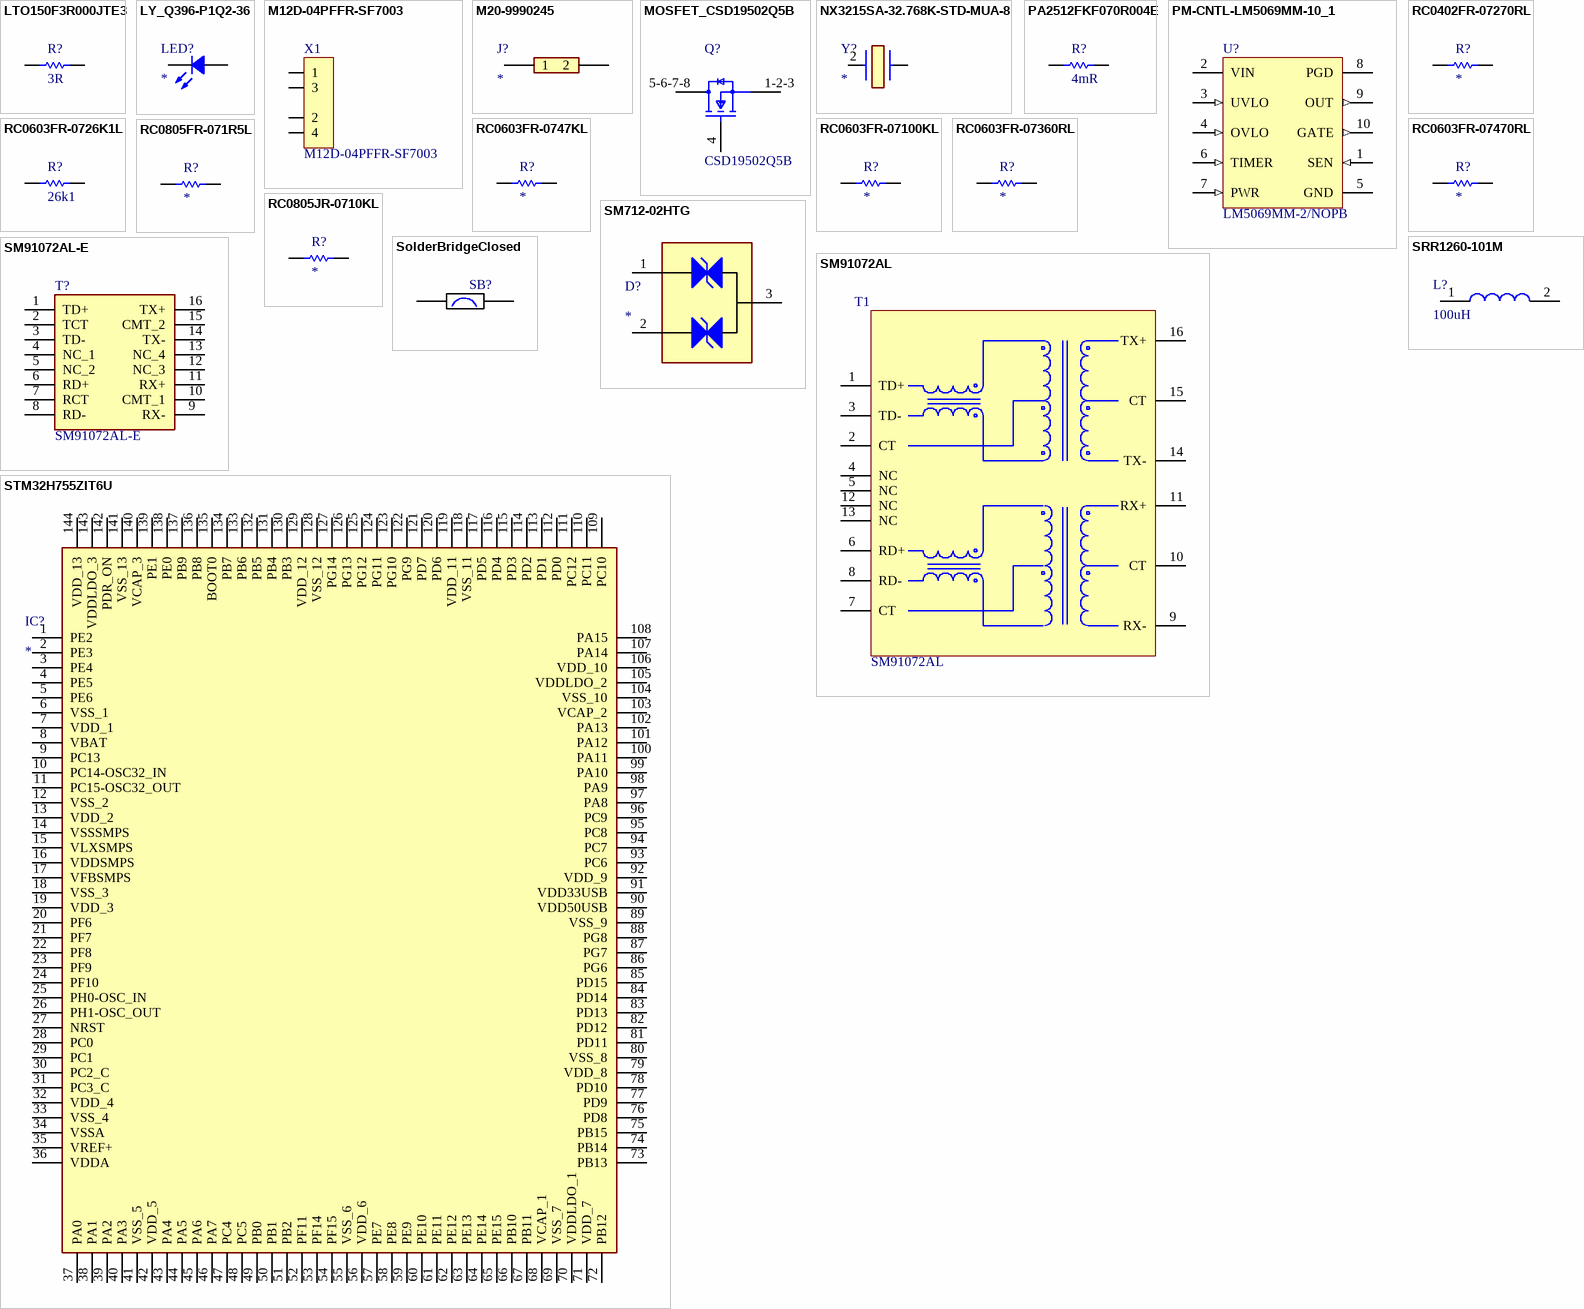
[diagram p1: symbols LTO150F3R000JTE3 to STM32H755ZIT6U]

## LTO150F3R000JTE3
designator R?, comment 3R
3 Ohms ±5% 150W durchkontaktierbarer Widerstand TO-247-2 Automobilzulassung AEC-Q200, Nicht induktiv Dickschicht; Supplier 1: Mouser; Supplier Part Number 1: 72-LTO150F3R000JTE3; Supplier 2: Digikey; Supplier Part Number 2: 716-LTO150F3R000JTE3-ND
footprint FP-LTO150-MFG
pins: 1, 2

## LY_Q396-P1Q2-36
designator LED?
Yellow LED; Manufacturer_Name: ams OSRAM; Manufacturer_Part_Number: LY Q396-P1Q2-36; Datasheet Link: https://look.ams-osram.com/m/7f3b49fc98442cfa/original/LY-Q396.pdf; Height: 0.4mm; Mouser Part Number: 720-LYQ396P1Q236; Mouser Price/Stock: https://www.mouser.co.uk/ProductDetail/OSRAM-Opto-Semiconductors/LY-Q396-P1Q2-36?qs=znB0%2F8lYn%252BufPazslz%2FXyQ%3D%3D; Arrow Part Number: LY Q396-P1Q2-36; Arrow Price/Stock: https://www.arrow.com/en/products/lyq396-p1q2-36/osram-opto-semiconductors; Supplier 1: Rutronik; Supplier Part Number 1: LED21766; Supplier 2: Avnet; Supplier Part Number 2: Q65111A3365; Supplier 3: Future Electronics; Supplier Part Number 3: 1170756; Supplier 4: TTI; Supplier Part Number 4: Q65111A3365; Supplier 5: Mouser; Supplier Part Number 5: 720-LYQ396P1Q236
footprint LEDC1608X40N
pins: 1, 2

## M12D-04PFFR-SF7003
designator X1
Conn Circular F 4 POS Solder RA Panel Mount 4 Terminal 1 Port; Manufacturer: Amphenol; Manufacturer Part Number: M12D-04PFFR-SF7003; RoHS: No; Pricing 1: 10=8.15600 (USD); ComponentLink1URL: http://www.amphenolltw.com/2012download/2D%20PDF/03_M%20Series%20Sensor%20Connectors/M12D-04PFFR-SF7003.pdf?src-supplier=Digi-Key; ComponentLink1Description: http://www.amphenolltw.com/2012download/2D%20PDF/03_M%20Series%20Sensor%20Connectors/M12D-04PFFR-SF7003.pdf?src-supplier=Digi-Key; Supplier 1: Digikey; Supplier Part Number 1: 4995-M12D-04PFFR-SF7003-ND
footprint M12D04PFFRSF7003
pins: 1, 2, 3, 4

## M20-9990245
designator J?
Connector; Manufacturer_Name: Harwin; Manufacturer_Part_Number: M20-9990245; Datasheet Link: https://cdn.harwin.com/pdfs/M20-999.pdf; Height: 8.64mm; Mouser Part Number: 855-M20-9990245; Mouser Price/Stock: https://www.mouser.co.uk/ProductDetail/Harwin/M20-9990245?qs=Jph8NoUxIfUDXEB%252Bi9kJRA%3D%3D; Supplier 1: Digikey; Supplier Part Number 1: 952-2261-ND; Supplier 2: Mouser; Supplier Part Number 2: 855-M20-9990245
footprint HDRV2W64P0X254_1X2_508X254X864P
pins: 1, 2

## MOSFET_CSD19502Q5B
designator Q?, comment CSD19502Q5B
MOSFET N-CH 80V 100A 8SON; Element Configuration: Single; Number of Channels: 1; Fall Time: 7ns; Threshold Voltage: 2.7V; Gate to Source Voltage (Vgs): 20V; Input Capacitance: 4.87nF; Drain to Source Resistance: 3.4mR; Turn-On Delay Time: 8ns; Power Dissipation: 3.2W; Rise Time: 6ns; Turn-Off Delay Time: 22ns; Rds On Max: 4.1mR; Number of Pins: 8; Min Operating Temperature: -55°C; Continuous Drain Current (ID): 100A; Number of Elements: 1; Max Operating Temperature: 150°C; Package Quantity: 2500; Packaging: Tape and Reel; Drain to Source Breakdown Voltage: 80V; RoHS Compliant: Yes; Mount: Surface Mount; Drain to Source Voltage (Vdss): 80V; REACH SVHC: No SVHC; Lead Free: Contains Lead; Max Power Dissipation: 3.2W; Supplier 1: Mouser; Supplier Part Number 1: 595-CSD19502Q5B; Supplier 2: Digikey; Supplier Part Number 2: 296-37194-1-ND
footprint FP-DNK0008A-MFG
pins: 1-2-3 S, 4 G, 5-6-7-8 D

## NX3215SA-32.768K-STD-MUA-8
designator Y?
Crystal or Oscillator; Manufacturer_Name: NDK; Manufacturer_Part_Number: NX3215SA-32.768K-STD-MUA-8; Datasheet Link: https://www.arrow.com/en/products/nx3215sa32.768kstdmua8/ndk; Height: 0.9mm; Mouser Part Number: 344-NX3215SA32768K8; Mouser Price/Stock: https://www.mouser.co.uk/ProductDetail/NDK/NX3215SA-32.768K-STD-MUA-8?qs=55YtniHzbhBdnrw6egvs7Q%3D%3D; Arrow Part Number: NX3215SA-32.768K-STD-MUA-8; Arrow Price/Stock: https://www.arrow.com/en/products/nx3215sa32.768kstdmua8/ndk; Supplier 1: Mouser; Supplier Part Number 1: 344-NX3215SA32768K8
footprint NX3215SA32768KSTDMUA8
pins: 2 CRYSTAL_2, ?1

## PA2512FKF070R004E
designator R?, comment 4mR
Fixed Resistor, Metal Strip, 1W, 0.004ohm, 0.0632V, 1% +/-Tol, 100ppm/Cel, Surface Mount, 2512; Manufacturer: Yageo; Manufacturer Part Number: PA2512FKF070R004E; Rated Temperature: 70°C; Temperature Coefficient (ppm/Cel): 100; Package Height: 0.63mm; Package Length: 6.35mm; Package Width: 3.18mm; Reference Standard: AEC-Q200; Supplier: Digikey; Supplier Part Number: YAG2139CT-ND; RoHS: Yes; Category: Chip SMD Resistors; Stock: 13389; Pricing: 1=0.6, 10=0.387, 25=0.3288, 50=0.2926, 100=0.2616, 250=0.2276, 500=0.20634, 1000=0.18827 (USD); Mounting Technology: Surface Mount; Pins: 2; Package Shape: Rectangular; Case/Package: 2512; Terminal Finish: Nickel; Min Operating Temperature: -55°C; Max Operating Temperature: 170°C; Tolerance: 1%; JESD-609 Code: e3; Resistor Type: FIXED RESISTOR; Construction: Chip; Packaging: Tape and Reel; Power: 1W; Value: 4mR; Technology: METAL ALLOY; Termination: Wraparound; Reach SVHC Compliant: Yes; RoHS Compliant: Yes; ComponentLink1URL: https://datasheet.ciiva.com:443/pdfs/VipMasterIC/IC/YAGO/YAGO-S-A0001793180/YAGO-S-A0001793180-1.pdf?src-supplier=IHS+Markit; ComponentLink1Description: https://datasheet.ciiva.com:443/pdfs/VipMasterIC/IC/YAGO/YAGO-S-A0001793180/YAGO-S-A0001793180-1.pdf?src-supplier=IHS+Markit; ComponentLink2URL: http://www.mouser.com/ds/2/447/PYu-PA_E_51_RoHS_5-1077983.pdf?src-supplier=Mouser; ComponentLink2Description: http://www.mouser.com/ds/2/447/PYu-PA_E_51_RoHS_5-1077983.pdf?src-supplier=Mouser; ComponentLink3URL: http://www.yageo.com/documents/recent/PYu-PA_E_51_RoHS_6.pdf?src-supplier=Digikey; ComponentLink3Description: http://www.yageo.com/documents/recent/PYu-PA_E_51_RoHS_6.pdf?src-supplier=Digikey; ComponentLink4URL: http://www.yageo.com/documents/recent/PYu-PA_E_51_RoHS_10.pdf?src-supplier=Digikey; ComponentLink4Description: http://www.yageo.com/documents/recent/PYu-PA_E_51_RoHS_10.pdf?src-supplier=Digikey; Supplier 1: Digikey; Supplier Part Number 1: CM1213A-04MROSCT-ND; Supplier 2: Mouser; Supplier Part Number 2: 748-CM1213A-04MR
footprint RESC6331X88N
pins: 1, 2

## PM-CNTL-LM5069MM-10_1
designator U?, comment LM5069MM-2/NOPB
Positive High Voltage Hot Swap / Inrush Current Controller with Power Limiting, 10-pin MSOP, Pb-Free; Manufacturer: Texas Instruments; PowerWise: N; PackageTopMarking: ZXTT*SNBB; CompType: MiscPower; PackageReference: DGS0010A; PackageDescription: Mini-SO, Molded, .118 x .118 x .034in Body, 10 Lead, .0197in Pitch; Code_JEDEC: MO-187-BA; ComponentLink1URL: http://www.ti.com/general/docs/lit/getliterature.tsp?genericPartNumber=LM5069&fileType=pdf; PinCount: 10; RoHS: Y; ComponentLink1Description: Datasheet URL; Supplier 1: Mouser; Supplier Part Number 1: 926-LM5069MM-2/NOPB; Supplier 2: Digikey; Supplier Part Number 2: LM5069MM-2/NOPBCT-ND
footprint FP-LTO150-MFG
pins: 1 SEN (in), 2 VIN (power), 3 UVLO (in), 4 OVLO (in), 5 GND (power), 6 TIMER (in), 7 PWR (in), 8 PGD (oc), 9 OUT (out), 10 GATE (out)

## RC0402FR-07270RL
designator R?
Resistor 270R; Manufacturer_Name: KEMET; Manufacturer_Part_Number: RC0402FR-07270RL; Datasheet Link: http://www.yageo.com/documents/recent/PYu-RC0402_51_RoHS_L_6_r.pdf; Height: 0.4mm; Mouser Part Number: 603-RC0402FR-07270RL; Mouser Price/Stock: https://www.mouser.co.uk/ProductDetail/Yageo/RC0402FR-07270RL?qs=beCmh%2FXShNd6fsxAzpS%2Fyw%3D%3D; Arrow Part Number: RC0402FR-07270RL; Arrow Price/Stock: https://www.arrow.com/en/products/rc0402fr-07270rl/yageo; Supplier 1: Digikey; Supplier Part Number 1: 311-270LRCT-ND; Supplier 2: Mouser; Supplier Part Number 2: 603-RC0402FR-07270RL
footprint RESC1005X40N
pins: 1, 2

## RC0603FR-0726K1L
designator R?, comment 26k1
No Description Available; Mfr_Name: Yageo; Supplier 1: Mouser; Supplier Part Number 1: 603-RC0603FR-0726K1L
footprint RC0603N_YAG
pins: 1, 2

## RC0603FR-0747KL
designator R?
Resistor 47k; Manufacturer_Name: KEMET; Manufacturer_Part_Number: RC0603FR-0747KL; Datasheet Link: http://www.yageo.com/documents/recent/PYu-RC0603_51_RoHS_L_v5.pdf; Height: 0.55mm; Mouser Part Number: 603-RC0603FR-0747KL; Mouser Price/Stock: https://www.mouser.co.uk/ProductDetail/YAGEO/RC0603FR-0747KL?qs=gt6vzsuosg3jXzmCiDCCdg%3D%3D; Arrow Part Number: RC0603FR-0747KL; Arrow Price/Stock: https://www.arrow.com/en/products/rc0603fr-0747kl/yageo?region=nac; Supplier 1: Digikey; Supplier Part Number 1: 311-47.0KHRCT-ND; Supplier 2: Digikey; Supplier Part Number 2: 311-47.0KHRDKR-ND
footprint RESC1608X55N
pins: 1, 2

## RC0603FR-07100KL
designator R?
Resistor 100k; Manufacturer_Name: YAGEO; Manufacturer_Part_Number: RC0603FR-07100KL; Datasheet Link: https://www.yageo.com/upload/media/product/productsearch/datasheet/rchip/PYu-RC_Group_51_RoHS_L_12.pdf; Height: 0.55mm; Mouser Part Number: 603-RC0603FR-07100KL; Mouser Price/Stock: https://www.mouser.co.uk/ProductDetail/YAGEO/RC0603FR-07100KL?qs=e1ok2LiJcmaihem8Va5%2Fsw%3D%3D; Arrow Part Number: RC0603FR-07100KL; Arrow Price/Stock: https://www.arrow.com/en/products/rc0603fr-07100kl/yageo?utm_currency=USD&region=nac; Supplier 1: Digikey; Supplier Part Number 1: 311-100KHRCT-ND
footprint RESC1608X55N
pins: 1, 2

## RC0603FR-07360RL
designator R?
Resistor 360R; Manufacturer_Name: KEMET; Manufacturer_Part_Number: RC0603FR-07360RL; Datasheet Link: http://www.yageo.com/documents/recent/PYu-RC0603_51_RoHS_L_v5.pdf; Height: 0.55mm; Mouser Part Number: 603-RC0603FR-07360RL; Mouser Price/Stock: https://www.mouser.com/Search/Refine.aspx?Keyword=603-RC0603FR-07360RL; Arrow Part Number: RC0603FR-07360RL; Arrow Price/Stock: https://www.arrow.com/en/products/rc0603fr-07360rl/yageo; Supplier 1: Digikey; Supplier Part Number 1: 311-360HRCT-ND
footprint RESC1608X55N
pins: 1, 2

## RC0603FR-07470RL
designator R?
Resistor 470R; Manufacturer_Name: KEMET; Manufacturer_Part_Number: RC0603FR-07470RL; Datasheet Link: http://www.yageo.com/documents/recent/PYu-RC0603_51_RoHS_L_v5.pdf; Height: 0.55mm; Mouser Part Number: 603-RC0603FR-07470RL; Mouser Price/Stock: https://www.mouser.co.uk/ProductDetail/YAGEO/RC0603FR-07470RL?qs=gt6vzsuosg2Xv5elfMBXPA%3D%3D; Supplier 1: Mouser; Supplier Part Number 1: 603-RC0603FR-07470RL
footprint RESC1608X55N
pins: 1, 2

## RC0805FR-071R5L
designator R?
Resistor; Manufacturer_Name: KEMET; Manufacturer_Part_Number: RC0805FR-071R5L; Datasheet Link: http://www.yageo.com/documents/recent/PYu-RC_Group_51_RoHS_L_10.pdf; Height: 0.6mm; Mouser Part Number: 603-RC0805FR-071R5L; Mouser Price/Stock: https://www.mouser.com/Search/Refine.aspx?Keyword=603-RC0805FR-071R5L
footprint RESC2012X60N
pins: 1, 2

## RC0805JR-0710KL
designator R?
Resistor; Manufacturer_Name: KEMET; Manufacturer_Part_Number: RC0805JR-0710KL; Datasheet Link: http://www.yageo.com/documents/recent/PYu-RC_Group_51_RoHS_L_10.pdf; Height: 0.6mm; Mouser Part Number: 603-RC0805JR-0710KL; Mouser Price/Stock: https://www.mouser.co.uk/ProductDetail/YAGEO/RC0805JR-0710KL?qs=ZFGQJeMQzF5q%2Fp77vM%2FrVQ%3D%3D; Arrow Part Number: RC0805JR-0710KL; Arrow Price/Stock: https://www.arrow.com/en/products/rc0805jr-0710kl/yageo; Supplier 1: Digikey; Supplier Part Number 1: 311-10KARCT-ND
footprint RESC2012X60N
pins: 1, 2

## SM712-02HTG
designator D?
TVS Diode (Bi-directional); Manufacturer_Name: LITTELFUSE; Manufacturer_Part_Number: SM712-02HTG; Datasheet Link: https://www.littelfuse.com/media?resourcetype=datasheets&itemid=a4019802-ff62-41ff-bf66-295f97422f81&filename=littelfuse-tvs-diode-array-sm712-datasheet; Height: 1.12mm; Mouser Part Number: 576-SM712-02HTG; Mouser Price/Stock: https://www.mouser.co.uk/ProductDetail/Littelfuse/SM712-02HTG?qs=aGgfWYEhH7lQgBVBPCUDkw%3D%3D; Arrow Part Number: SM712-02HTG; Arrow Price/Stock: https://www.arrow.com/en/products/sm712-02htg/littelfuse?utm_currency=USD&region=nac; Supplier 1: Digikey; Supplier Part Number 1: F6450CT-ND
footprint SM71202HTG
pins: 1, 2, 3

## SM91072AL
designator T1
Telecom Transformer 1: 1 1.4Ohm Prim. DCR 1Ohm Sec. DCR 16 Terminal Gull Wing SMD Automotive; Manufacturer: Bourns; Value: 350uH; Turns Ratio: 1:1; ComponentLink1URL: http://www.farnell.com/datasheets/2169310.pdf?src-supplier=Farnell; ComponentLink1Description: http://www.farnell.com/datasheets/2169310.pdf?src-supplier=Farnell; ComponentLink2URL: https://www.bourns.com/docs/Product-Datasheets/sm13072apel.pdf?src-supplier=Digi-Key; ComponentLink2Description: https://www.bourns.com/docs/Product-Datasheets/sm13072apel.pdf?src-supplier=Digi-Key; ComponentLink3URL: http://www.farnell.com/datasheets/2169310.pdf?src-supplier=Newark; ComponentLink3Description: http://www.farnell.com/datasheets/2169310.pdf?src-supplier=Newark; Supplier: Digikey; Supplier Part Number: 118-SM91072AL-ECT-ND; Manufacturer Part Number: SM91072AL; RoHS: Yes; Category: Uncategorized; Stock: 2173; Pricing: 1=4.72, 10=3.828, 25=3.0952, 50=2.8998, 100=2.7695, 250=2.68808 (USD); Mounting Technology: Surface Mount; Min Operating Temperature: -40°C; Max Operating Temperature: 125°C; Series: Automotive, AEC-Q200, SM; Supplier 1: Mouser; Supplier Part Number 1: 652-SM91072AL-E; Supplier 2: Digikey; Supplier Part Number 2: 118-SM91072AL-EDKR-ND; Supplier 3: Digikey; Supplier Part Number 3: 118-SM91072AL-ETR-ND
footprint SOIC127P950X590-16N
pins: 1 TD+, 2 CT, 3 TD-, 4 NC, 5 NC, 6 RD+, 7 CT, 8 RD-, 9 RX-, 10 CT, 11 RX+, 12 NC, 13 NC, 14 TX-, 15 CT, 16 TX+

## SM91072AL-E
designator T?
Transformer; Manufacturer_Name: Bourns; Datasheet Link: https://www.bourns.com/docs/product-datasheets/SM91072AL.pdf; Height: 5.9mm; Manufacturer_Part_Number: SM91072AL-E; Mouser Part Number: 652-SM91072AL-E; Mouser Price/Stock: https://www.mouser.co.uk/ProductDetail/Bourns/SM91072AL-E?qs=GBLSl2Akirv3SGhCpik42w%3D%3D; Arrow Part Number: SM91072AL-E; Arrow Price/Stock: https://www.arrow.com/en/products/sm91072al-e/bourns?region=nac; Supplier 1: Mouser; Supplier Part Number 1: 652-SM91072AL-E; Supplier 2: Digikey; Supplier Part Number 2: 118-SM91072AL-ECT-ND
footprint SOIC127P950X590-16N
pins: 1 TD+, 2 TCT, 3 TD-, 4 NC_1, 5 NC_2, 6 RD+, 7 RCT, 8 RD-, 9 RX-, 10 CMT_1, 11 RX+, 12 NC_3, 13 NC_4, 14 TX-, 15 CMT_2, 16 TX+

## SolderBridgeClosed
designator SB?  (value not drawn)
footprint FP_SolderBridge_Closed
pins: 1, 2

## SRR1260-101M
designator L?, comment 100uH
Inductor; Manufacturer_Name: Bourns; Manufacturer_Part_Number: SRR1260-101M; Datasheet Link: https://componentsearchengine.com/Datasheets/1/SRR1260-101M.pdf; Height: 6.5mm; Mouser Part Number: 652-SRR1260-101M; Mouser Price/Stock: https://www.mouser.co.uk/ProductDetail/Bourns/SRR1260-101M?qs=uD%2FoUDWqfvQozr%2Ff4%252BPuSQ%3D%3D; Arrow Part Number: SRR1260-101M; Arrow Price/Stock: https://www.arrow.com/en/products/srr1260-101m/bourns?utm_currency=USD&region=nac; Supplier 1: Mouser; Supplier Part Number 1: 652-SRR1260-101M; Value: 100uH
footprint SRR1260101M
pins: 1, 2

## STM32H755ZIT6U
designator IC?
Integrated Circuit; Manufacturer_Name: STMicroelectronics; Manufacturer_Part_Number: STM32H755ZIT6U; Datasheet Link: https://www.st.com/resource/en/datasheet/stm32h755zi.pdf; Height: 1.6mm; Mouser Part Number: 511-STM32H755ZIT6U; Mouser Price/Stock: https://www.mouser.com/Search/Refine.aspx?Keyword=511-STM32H755ZIT6U
footprint QFP50P2200X2200X160-144N
pins: 1 PE2, 2 PE3, 3 PE4, 4 PE5, 5 PE6, 6 VSS_1, 7 VDD_1, 8 VBAT, 9 PC13, 10 PC14-OSC32_IN, 11 PC15-OSC32_OUT, 12 VSS_2, 13 VDD_2, 14 VSSSMPS, 15 VLXSMPS, 16 VDDSMPS, 17 VFBSMPS, 18 VSS_3, 19 VDD_3, 20 PF6, 21 PF7, 22 PF8, 23 PF9, 24 PF10, 25 PH0-OSC_IN, 26 PH1-OSC_OUT, 27 NRST, 28 PC0, 29 PC1, 30 PC2_C, 31 PC3_C, 32 VDD_4, 33 VSS_4, 34 VSSA, 35 VREF+, 36 VDDA, 37 PA0, 38 PA1, 39 PA2, 40 PA3, 41 VSS_5, 42 VDD_5, 43 PA4, 44 PA5, 45 PA6, 46 PA7, 47 PC4, 48 PC5, 49 PB0, 50 PB1, 51 PB2, 52 PF11, 53 PF14, 54 PF15, 55 VSS_6, 56 VDD_6, 57 PE7, 58 PE8, 59 PE9, 60 PE10, 61 PE11, 62 PE12, 63 PE13, 64 PE14, 65 PE15, 66 PB10, 67 PB11, 68 VCAP_1, 69 VSS_7, 70 VDDLDO_1, 71 VDD_7, 72 PB12, 73 PB13, 74 PB14, 75 PB15, 76 PD8, 77 PD9, 78 PD10, 79 VDD_8, 80 VSS_8, 81 PD11, 82 PD12, 83 PD13, 84 PD14, 85 PD15, 86 PG6, 87 PG7, 88 PG8, 89 VSS_9, 90 VDD50USB, 91 VDD33USB, 92 VDD_9, 93 PC6, 94 PC7, 95 PC8, 96 PC9, 97 PA8, 98 PA9, 99 PA10, 100 PA11, 101 PA12, 102 PA13, 103 VCAP_2, 104 VSS_10, 105 VDDLDO_2, 106 VDD_10, 107 PA14, 108 PA15, 109 PC10, 110 PC11, 111 PC12, 112 PD0, 113 PD1, 114 PD2, 115 PD3, 116 PD4, 117 PD5, 118 VSS_11, 119 VDD_11, 120 PD6, 121 PD7, 122 PG9, 123 PG10, 124 PG11, 125 PG12, 126 PG13, 127 PG14, 128 VSS_12, 129 VDD_12, 130 PB3, 131 PB4, 132 PB5, 133 PB6, 134 PB7, 135 BOOT0, 136 PB8, 137 PB9, 138 PE0, 139 PE1, 140 VCAP_3, 141 VSS_13, 142 PDR_ON, 143 VDDLDO_3, 144 VDD_13

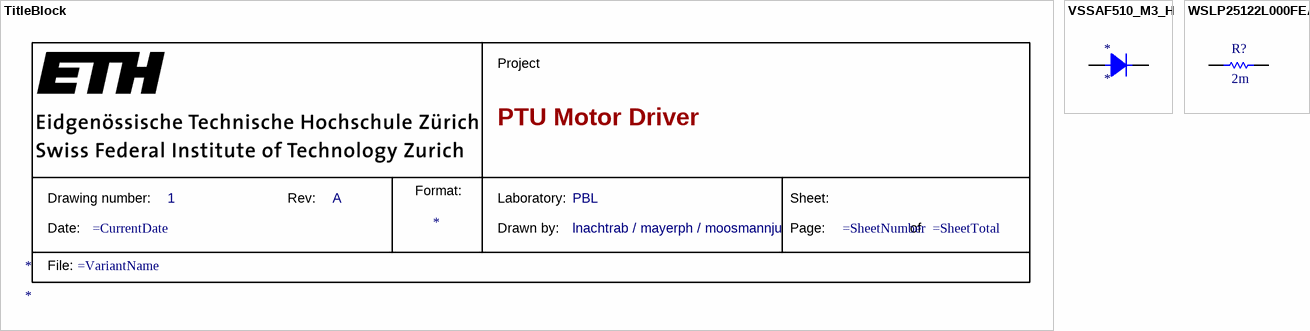
[diagram p2: symbols TitleBlock to WSLP25122L000FEA]

## TitleBlock
designator *  (graphical)
Parameter 2: *; Format: *
text: Project; PTU Motor Driver; Format:; Drawing number:; 1; Rev:; A; Laboratory:; PBL; Sheet:; Date:; Drawn by:; lnachtrab / mayerph / moosmannju; Page:; of; File:

## VSSAF510_M3_H
designator *
Supplier 1: Digikey; Supplier Part Number 1: VSSAF510-M3/HGICT-ND
footprint CR_SLIMSMA_DO-221AC_VIS-L
pins: 1 CATHODE, 2 ANODE

## WSLP25122L000FEA
designator R?, comment 2m
Fixed Resistor, Metal Strip, 3W, 0.002ohm, 0.077V, 1% +/-Tol, 275ppm/Cel, Surface Mount, 2512; Manufacturer: Vishay Dale; Manufacturer Part Number: WSLP25122L000FEA; Rated Temperature: 70°C; Value: 2mR; Temperature Coefficient (ppm/Cel): 275; Package Height: 0.635mm; Package Length: 6.35mm; Package Width: 3.18mm; Reference Standard: AEC-Q200; Supplier: Mouser; Supplier Part Number: 71-WSLP25122L000FEA; RoHS: Yes; Category: Chip SMD Resistors; Stock: 374778; Pricing: 1=1.28, 10=0.737, 50=0.6, 100=0.449, 1000=0.308, 10000=0.27 (USD); Mounting Technology: Surface Mount; Pins: 2; Package Shape: Rectangular; Case/Package: 2512; Terminal Finish: Nickel; Min Operating Temperature: -65°C; Max Operating Temperature: 170°C; Tolerance: 1%; JESD-609 Code: e3; Resistor Type: FIXED RESISTOR; Construction: Chip; Packaging: Tape and Reel; Power: 3W; Technology: METAL STRIP; Termination: Wraparound; Reach SVHC Compliant: Yes; RoHS Compliant: Yes; ComponentLink1URL: https://datasheet.ciiva.com:443/pdfs/VipMasterIC/IC/VISH/VISH-S-A0009590861/VISH-S-A0009590861-1.pdf?src-supplier=IHS+Markit; ComponentLink1Description: https://datasheet.ciiva.com:443/pdfs/VipMasterIC/IC/VISH/VISH-S-A0009590861/VISH-S-A0009590861-1.pdf?src-supplier=IHS+Markit; ComponentLink2URL: https://datasheet.ciiva.com/48527/wslp-48527354.pdf?src-supplier=Avnet; ComponentLink2Description: https://datasheet.ciiva.com/48527/wslp-48527354.pdf?src-supplier=Avnet; Supplier 1: Mouser; Supplier Part Number 1: 71-WSLP25122L000FEA; Supplier 2: Digikey; Supplier Part Number 2: 541-10148-1-ND
footprint FP-WSLP2512-0R001-0R0049-IPC_B
pins: 1, 2